# Altium footprint library CUI_PJ102AH.PcbLib: 1 footprints
Each footprint in its own frame and in the unit in brackets; x right, y up, seen from the top. Pads: shape width x height; smd on the part's side, far side on the other; paste and mask are expansions set on the pad; w line width, h text height; cw(c..) or ccw(c..) is an arc to the next point about the centre after c.
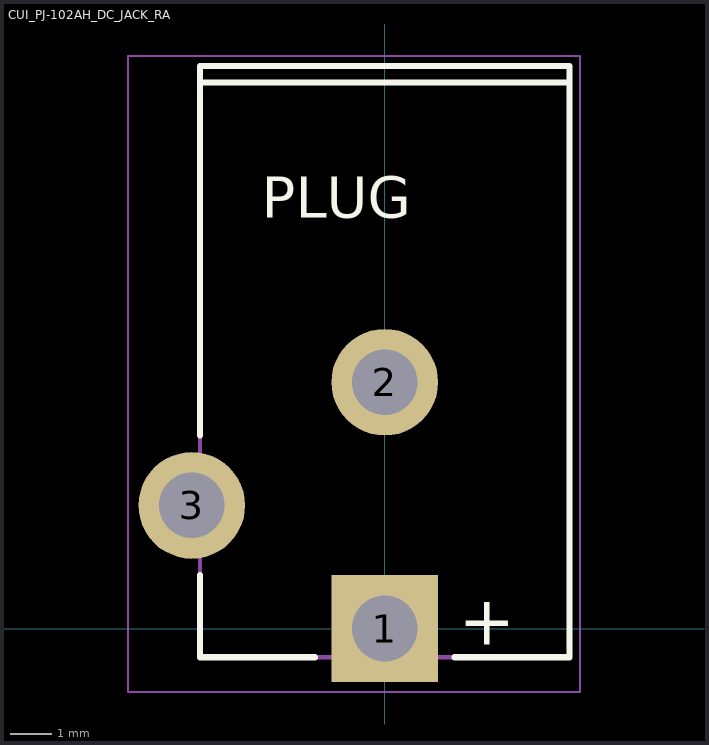
[diagram p0: the footprint, top view; thin cyan lines are the x and y axes]

## CUI_PJ-102AH_DC_JACK_RA [mm] "Same Sky/CUI PJ-102AH DC jack, 2.0 mm pin, right angle THT (datasheet 10/30/2019); pin 1 = centre, 2 = sleeve, 3 = switch; mating face at +Y"
pads (3):
  rect 2.6x2.6 hole 1.6: 1(0,0)
  round 2.6 hole 1.6: 2(0,6) 3(-4.7,3)
Top Overlay:
  lines w0.15: -4.5,1.3 -4.5,-0.7 -1.7,-0.7 ; -4.5,4.7 -4.5,13.7 4.5,13.7 4.5,-0.7 1.7,-0.7 ; -4.5,13.3 4.5,13.3
  text "PLUG" at -3,10 h1
  text "+" at 1.8,-0.4 h1.2
Mechanical 1:
  lines w0.05: -6.25,-1.55 -6.25,13.95 4.75,13.95 4.75,-1.55 -6.25,-1.55
Mechanical 13:
  lines w0.1: -4.5,-0.7 -4.5,13.7 4.5,13.7 4.5,-0.7 -4.5,-0.7
3D body: height 11, standoff 0, extent -4.5,-0.7 4.5,13.7